# Altium footprint library TAJD.PcbLib: 1 footprints
Each footprint in its own frame and in the unit in brackets; x right, y up, seen from the top. Pads: shape width x height; smd on the part's side, far side on the other; paste and mask are expansions set on the pad; w line width, h text height; cw(c..) or ccw(c..) is an arc to the next point about the centre after c.
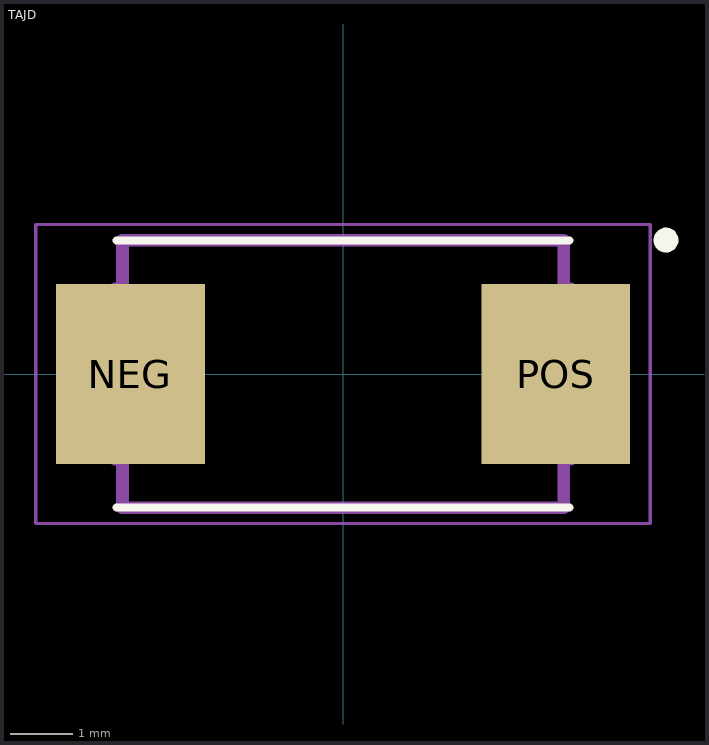
[diagram p0: the footprint, top view; thin cyan lines are the x and y axes]

## TAJD [mm]
pads (2):
  rect 2.4x2.9 smd: NEG(-3.429,0) POS(3.429,0)
Top Overlay:
  circle w0.2: c5.207,2.159 r0.1
  lines w0.127: -3.65,-2.15 3.65,-2.15 ; -3.65,2.15 3.65,2.15
Mechanical 13:
  lines w0.152: -3.683,-1.397 -3.683,1.397 ; 3.683,-1.397 3.683,1.397
  lines w0.203: -3.556,-2.159 3.556,-2.159 3.556,2.159 -3.556,2.159 -3.556,-2.159
Mechanical 15:
  lines w0.051: -4.953,-2.413 -4.953,2.413 4.953,2.413 4.953,-2.413 -4.953,-2.413
3D body "TAJD.step": height 3.1, standoff -0.04, extent -4.554,-2.305 4.442,2.305